# Altium footprint library THORLABS_S7060R.PcbLib: 1 footprints
Each footprint in its own frame and in the unit in brackets; x right, y up, seen from the top. Pads: shape width x height; smd on the part's side, far side on the other; paste and mask are expansions set on the pad; w line width, h text height; cw(c..) or ccw(c..) is an arc to the next point about the centre after c.
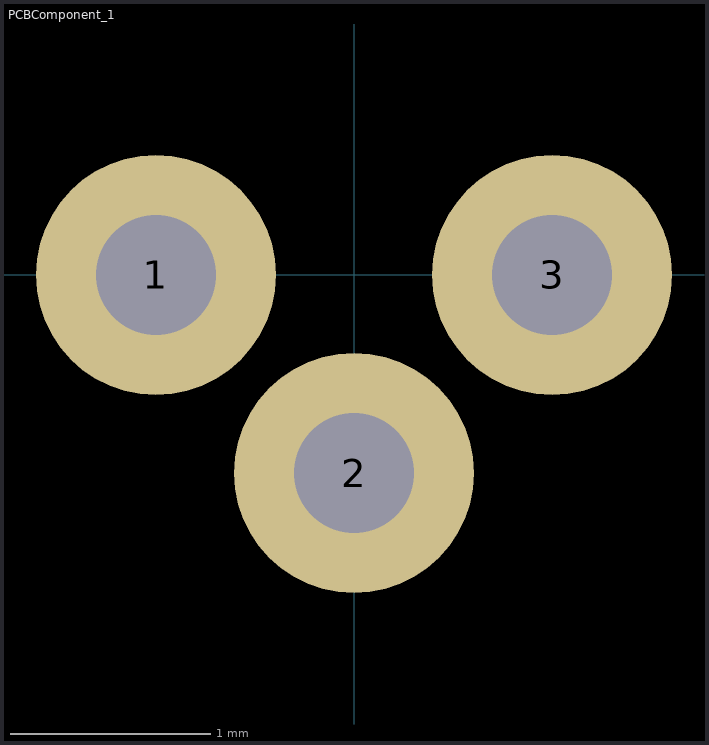
[diagram p0: the footprint, top view; thin cyan lines are the x and y axes]

## PCBComponent_1 [mm]
pads (3):
  round 1.2 hole 0.6: 1(-0.99,0) 2(0,-0.99) 3(0.99,0)
3D body "S7060R-Step.step": height 5.04, standoff -2.58, extent -2.54,-2.54 2.54,2.54